# Altium footprint library ISO6541FQDBQRQ1.PcbLib: 3 footprints
Each footprint in its own frame and in the unit in brackets; x right, y up, seen from the top. Pads: shape width x height; smd on the part's side, far side on the other; paste and mask are expansions set on the pad; w line width, h text height; cw(c..) or ccw(c..) is an arc to the next point about the centre after c.
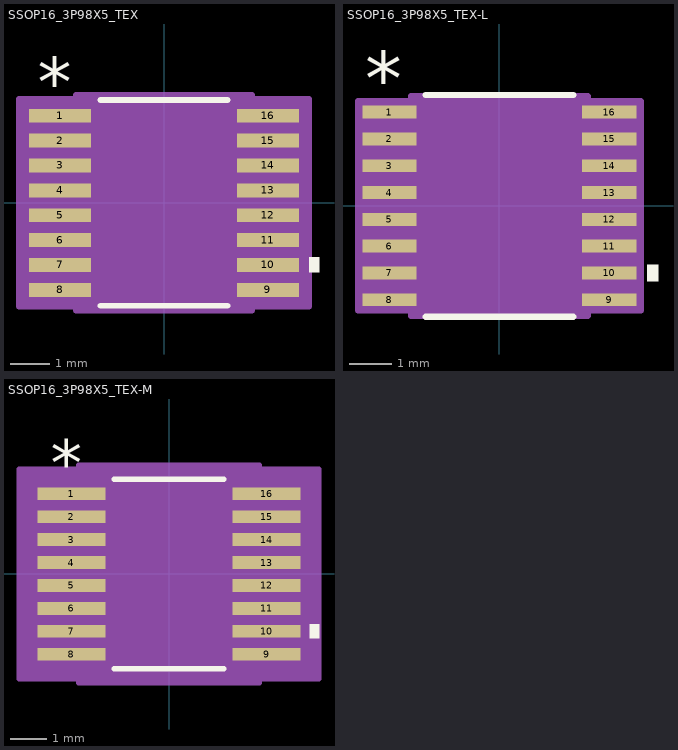
[diagram p0: the footprints below, top view; thin cyan lines are the x and y axes]

## SSOP16_3P98X5_TEX [mil]
pads (16):
  rect 62.56x13.97 smd paste+0 mask+0: 1(-104.5,87.5) 2(-104.5,62.5) 3(-104.5,37.5) 4(-104.5,12.5) 5(-104.5,-12.5) 6(-104.5,-37.5) 7(-104.5,-62.5) 8(-104.5,-87.5) 9(104.5,-87.5) 10(104.5,-62.5) 11(104.5,-37.5) 12(104.5,-12.5) 13(104.5,12.5) 14(104.5,37.5) 15(104.5,62.5) 16(104.5,87.5)
Top Overlay:
  region: 145.78,-55 155.78,-55 155.78,-70 145.78,-70
  lines w6: -63.72,-103.5 63.72,-103.5 ; -63.72,103.5 63.72,103.5
  text ".Designator" at -137.5,-25 h50
  text "*" at -127,96.47 h50
Mechanical 13:
  lines w1: -12,98.5 ccw(c0,98.5) 12,98.5 ; -122,-93.5 -122,-81.5 -78.5,-81.5 -78.5,-93.5 -122,-93.5 ; -122,-68.5 -122,-56.5 -78.5,-56.5 -78.5,-68.5 -122,-68.5 ; -122,-43.5 -122,-31.5 -78.5,-31.5 -78.5,-43.5 -122,-43.5 ; -122,-18.5 -122,-6.5 -78.5,-6.5 -78.5,-18.5 -122,-18.5 ; -122,6.5 -122,18.5 -78.5,18.5 -78.5,6.5 -122,6.5 ; -122,31.5 -122,43.5 -78.5,43.5 -78.5,31.5 -122,31.5 ; -122,56.5 -122,68.5 -78.5,68.5 -78.5,56.5 -122,56.5 ; -122,81.5 -122,93.5 -78.5,93.5 -78.5,81.5 -122,81.5 ; -78.5,-98.5 78.5,-98.5 78.5,98.5 -78.5,98.5 -78.5,-98.5 ; 78.5,-93.5 78.5,-81.5 122,-81.5 122,-93.5 78.5,-93.5 ; 78.5,-68.5 78.5,-56.5 122,-56.5 122,-68.5 78.5,-68.5 ; 78.5,-43.5 78.5,-31.5 122,-31.5 122,-43.5 78.5,-43.5 ; 78.5,-18.5 78.5,-6.5 122,-6.5 122,-18.5 78.5,-18.5 ; 78.5,6.5 78.5,18.5 122,18.5 122,6.5 78.5,6.5 ; 78.5,31.5 78.5,43.5 122,43.5 122,31.5 78.5,31.5 ; 78.5,56.5 78.5,68.5 122,68.5 122,56.5 78.5,56.5 ; 78.5,81.5 78.5,93.5 122,93.5 122,81.5 78.5,81.5
  text "*" at -76,45.5 h50
  text ".Designator" at -137.5,-25 h50
Mechanical 15:
  region: -88.5,-104.48 -145.78,-104.48 -145.78,104.48 -88.5,104.48 -88.5,108.5 88.5,108.5 88.5,104.48 145.78,104.48 145.78,-104.48 88.5,-104.48 88.5,-108.5 -88.5,-108.5
  lines w6: -145.78,-104.48 -145.78,104.48 -88.5,104.48 -88.5,108.5 88.5,108.5 88.5,104.48 145.78,104.48 145.78,-104.48 88.5,-104.48 88.5,-108.5 -88.5,-108.5 -88.5,-104.48 -145.78,-104.48
3D body "SSOP16_3P98X5_TEX.step": height 69.09, standoff 0, extent -122.01,-98.5 122.01,98.5

## SSOP16_3P98X5_TEX-L [mil]
pads (16):
  rect 50.75x12 smd paste+0 mask+0: 1(-102.53,87.5) 2(-102.53,62.5) 3(-102.53,37.5) 4(-102.53,12.5) 5(-102.53,-12.5) 6(-102.53,-37.5) 7(-102.53,-62.5) 8(-102.53,-87.5) 9(102.53,-87.5) 10(102.53,-62.5) 11(102.53,-37.5) 12(102.53,-12.5) 13(102.53,12.5) 14(102.53,37.5) 15(102.53,62.5) 16(102.53,87.5)
Top Overlay:
  region: 137.91,-55 147.91,-55 147.91,-70 137.91,-70
  lines w6: -68.7,-103.5 68.7,-103.5 ; -68.7,103.5 68.7,103.5
  text ".Designator" at -137.5,-25 h50
  text "*" at -125.03,94.5 h50
Mechanical 13:
  lines w1: -12,98.5 ccw(c0,98.5) 12,98.5 ; -122,-93.5 -122,-81.5 -78.5,-81.5 -78.5,-93.5 -122,-93.5 ; -122,-68.5 -122,-56.5 -78.5,-56.5 -78.5,-68.5 -122,-68.5 ; -122,-43.5 -122,-31.5 -78.5,-31.5 -78.5,-43.5 -122,-43.5 ; -122,-18.5 -122,-6.5 -78.5,-6.5 -78.5,-18.5 -122,-18.5 ; -122,6.5 -122,18.5 -78.5,18.5 -78.5,6.5 -122,6.5 ; -122,31.5 -122,43.5 -78.5,43.5 -78.5,31.5 -122,31.5 ; -122,56.5 -122,68.5 -78.5,68.5 -78.5,56.5 -122,56.5 ; -122,81.5 -122,93.5 -78.5,93.5 -78.5,81.5 -122,81.5 ; -78.5,-98.5 78.5,-98.5 78.5,98.5 -78.5,98.5 -78.5,-98.5 ; 78.5,-93.5 78.5,-81.5 122,-81.5 122,-93.5 78.5,-93.5 ; 78.5,-68.5 78.5,-56.5 122,-56.5 122,-68.5 78.5,-68.5 ; 78.5,-43.5 78.5,-31.5 122,-31.5 122,-43.5 78.5,-43.5 ; 78.5,-18.5 78.5,-6.5 122,-6.5 122,-18.5 78.5,-18.5 ; 78.5,6.5 78.5,18.5 122,18.5 122,6.5 78.5,6.5 ; 78.5,31.5 78.5,43.5 122,43.5 122,31.5 78.5,31.5 ; 78.5,56.5 78.5,68.5 122,68.5 122,56.5 78.5,56.5 ; 78.5,81.5 78.5,93.5 122,93.5 122,81.5 78.5,81.5
  text "*" at -76,45.5 h50
  text ".Designator" at -137.5,-25 h50
Mechanical 15:
  region: -82.5,-97.5 -131.91,-97.5 -131.91,97.5 -82.5,97.5 -82.5,102.5 82.5,102.5 82.5,97.5 131.91,97.5 131.91,-97.5 82.5,-97.5 82.5,-102.5 -82.5,-102.5
  lines w6: -131.91,-97.5 -131.91,97.5 -82.5,97.5 -82.5,102.5 82.5,102.5 82.5,97.5 131.91,97.5 131.91,-97.5 82.5,-97.5 82.5,-102.5 -82.5,-102.5 -82.5,-97.5 -131.91,-97.5
3D body "SSOP16_3P98X5_TEX.step": height 69.09, standoff 0, extent -122.01,-98.5 122.01,98.5

## SSOP16_3P98X5_TEX-M [mil]
pads (16):
  rect 74.37x13.97 smd paste+0 mask+0: 1(-106.47,87.5) 2(-106.47,62.5) 3(-106.47,37.5) 4(-106.47,12.5) 5(-106.47,-12.5) 6(-106.47,-37.5) 7(-106.47,-62.5) 8(-106.47,-87.5) 9(106.47,-87.5) 10(106.47,-62.5) 11(106.47,-37.5) 12(106.47,-12.5) 13(106.47,12.5) 14(106.47,37.5) 15(106.47,62.5) 16(106.47,87.5)
Top Overlay:
  region: 153.65,-55 163.65,-55 163.65,-70 153.65,-70
  lines w6: -59.78,-103.5 59.78,-103.5 ; -59.78,103.5 59.78,103.5
  text ".Designator" at -137.5,-25 h50
  text "*" at -128.97,96.47 h50
Mechanical 13:
  lines w1: -12,98.5 ccw(c0,98.5) 12,98.5 ; -122,-93.5 -122,-81.5 -78.5,-81.5 -78.5,-93.5 -122,-93.5 ; -122,-68.5 -122,-56.5 -78.5,-56.5 -78.5,-68.5 -122,-68.5 ; -122,-43.5 -122,-31.5 -78.5,-31.5 -78.5,-43.5 -122,-43.5 ; -122,-18.5 -122,-6.5 -78.5,-6.5 -78.5,-18.5 -122,-18.5 ; -122,6.5 -122,18.5 -78.5,18.5 -78.5,6.5 -122,6.5 ; -122,31.5 -122,43.5 -78.5,43.5 -78.5,31.5 -122,31.5 ; -122,56.5 -122,68.5 -78.5,68.5 -78.5,56.5 -122,56.5 ; -122,81.5 -122,93.5 -78.5,93.5 -78.5,81.5 -122,81.5 ; -78.5,-98.5 78.5,-98.5 78.5,98.5 -78.5,98.5 -78.5,-98.5 ; 78.5,-93.5 78.5,-81.5 122,-81.5 122,-93.5 78.5,-93.5 ; 78.5,-68.5 78.5,-56.5 122,-56.5 122,-68.5 78.5,-68.5 ; 78.5,-43.5 78.5,-31.5 122,-31.5 122,-43.5 78.5,-43.5 ; 78.5,-18.5 78.5,-6.5 122,-6.5 122,-18.5 78.5,-18.5 ; 78.5,6.5 78.5,18.5 122,18.5 122,6.5 78.5,6.5 ; 78.5,31.5 78.5,43.5 122,43.5 122,31.5 78.5,31.5 ; 78.5,56.5 78.5,68.5 122,68.5 122,56.5 78.5,56.5 ; 78.5,81.5 78.5,93.5 122,93.5 122,81.5 78.5,81.5
  text "*" at -76,45.5 h50
  text ".Designator" at -137.5,-25 h50
Mechanical 15:
  region: -98.5,-114.48 -163.65,-114.48 -163.65,114.48 -98.5,114.48 -98.5,118.5 98.5,118.5 98.5,114.48 163.65,114.48 163.65,-114.48 98.5,-114.48 98.5,-118.5 -98.5,-118.5
  lines w6: -163.65,-114.48 -163.65,114.48 -98.5,114.48 -98.5,118.5 98.5,118.5 98.5,114.48 163.65,114.48 163.65,-114.48 98.5,-114.48 98.5,-118.5 -98.5,-118.5 -98.5,-114.48 -163.65,-114.48
3D body "SSOP16_3P98X5_TEX.step": height 69.09, standoff 0, extent -122.01,-98.5 122.01,98.5